# Altium footprint library MTGW_R09.PcbLib: 55 footprints (part 3 of 4)
Each footprint in its own frame and in the unit in brackets; x right, y up, seen from the top. Pads: shape width x height; smd on the part's side, far side on the other; paste and mask are expansions set on the pad; w line width, h text height; cw(c..) or ccw(c..) is an arc to the next point about the centre after c.
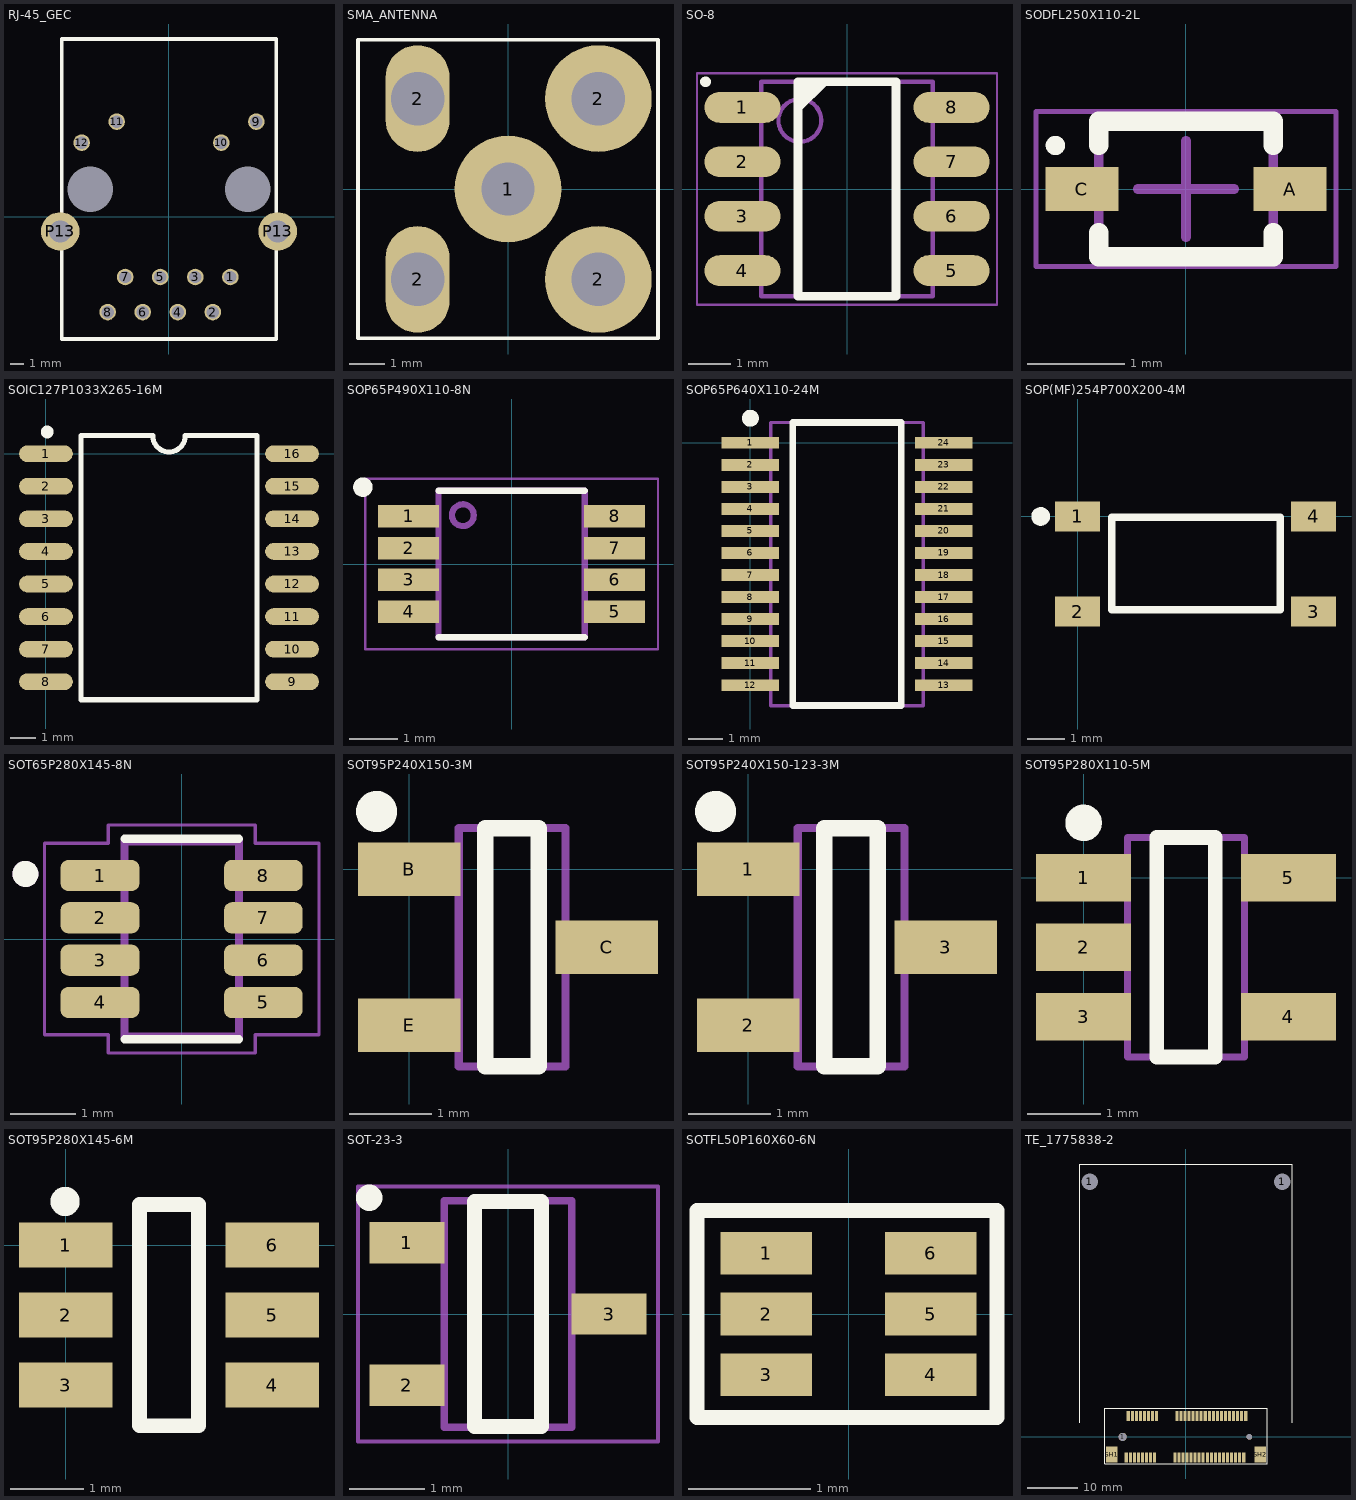
[diagram p2: the footprints below, top view; thin cyan lines are the x and y axes]

## RJ-45_GEC [mm]
pads (16):
  round 1.2 hole 0.9: 1(4.445,-4.355) 2(3.175,-6.895) 3(1.905,-4.355) 4(0.635,-6.895) 5(-0.635,-4.355) 6(-1.905,-6.895) 7(-3.175,-4.355) 8(-4.445,-6.895) 9(6.325,6.895) 10(3.785,5.375) 11(-3.785,6.895) 12(-6.325,5.375)
  round 0 hole 3.3 unplated: P11(5.715,1.995) P12(-5.715,1.995)
  round 2.794 hole 1.6: P13(-7.875,-1.055) P13(7.875,-1.055)
Top Overlay:
  lines w0.254: -7.775,-8.845 -7.775,12.875 7.775,12.875 7.775,-8.845 -7.775,-8.845
3D body "User Library-KLS12-TL076.step": height 15.8, standoff -3.5, extent -9.875,-8.555 9.875,13.345

## SMA_ANTENNA [mm]
pads (5):
  round 3 hole 1.5: 1(0,0) 2(2.54,-2.54) 2(2.54,2.54)
  oval 1.8x3 hole 1.5: 2(-2.54,-2.54) 2(-2.54,2.54)
Top Overlay:
  lines w0.1: -4.216,-4.191 -4.216,4.191 4.216,4.191 4.216,-4.191 -4.216,-4.191
3D body "731000114.stp": height 9.58, standoff -3.92, extent -11.625,-3.175 3.175,3.175

## SO-8 [mm]
pads (8):
  oval 1.78x0.72 smd: 1(-2.44,1.905) 2(-2.44,0.635) 3(-2.44,-0.635) 4(-2.44,-1.905) 5(2.44,-1.905) 6(2.44,-0.635) 7(2.44,0.635) 8(2.44,1.905)
Top Overlay:
  circle w0.25: c-3.3,2.5 r0
  region: -0.45,2.45 -1.1,1.8 -1.1,2.45
  lines w0.2: -1.143,-2.5 -1.143,2.5 1.143,2.5 1.143,-2.5 -1.143,-2.5
Mechanical 13:
  circle w0.1: c-1.1,1.6 r0.5
  lines w0.1: -2,-2.5 -2,2.5 2,2.5 2,-2.5 -2,-2.5
Mechanical 15:
  lines w0.05: -3.5,-2.7 -3.5,2.7 3.5,2.7 3.5,-2.7 -3.5,-2.7
  text ".Designator" at -3.4,1.6 h1.5
3D body "User Library-SO8-1.step": height 1.75, standoff 0, extent -3.1,-2.5 3.1,2.5

## SODFL250X110-2L [mm]
pads (2):
  rect 0.75x0.45 smd: A(1.075,0) C(-1.075,0)
Top Overlay:
  circle w0.1: c-1.35,0.45 r0.05
  lines w0.2: -0.9,-0.45 -0.9,-0.7 0.9,-0.7 0.9,-0.45 ; -0.9,0.45 -0.9,0.7 0.9,0.7 0.9,0.45
Mechanical 13:
  lines w0.1: -0.9,-0.7 0.9,-0.7 0.9,0.7 -0.9,0.7 -0.9,-0.7
Mechanical 15:
  lines w0.05: -1.55,-0.8 1.55,-0.8 1.55,0.8 -1.55,0.8 -1.55,-0.8
  lines w0.1: -0.5,0 0.5,0 ; 0,-0.5 0,0.5
3D body: height 1.1, standoff 0, extent -0.9,-0.7 0.9,0.7

## SOIC127P1033X265-16M [mm]
pads (16):
  oval 2.1x0.65 smd: 1(0,0) 2(0,-1.27) 3(0,-2.54) 4(0,-3.81) 5(0,-5.08) 6(0,-6.35) 7(0,-7.62) 8(0,-8.89) 9(9.6,-8.89) 10(9.6,-7.62) 11(9.6,-6.35) 12(9.6,-5.08) 13(9.6,-3.81) 14(9.6,-2.54) 15(9.6,-1.27) 16(9.6,0)
Top Overlay:
  circle w0.25: c0.05,0.85 r0.125
  lines w0.2: 1.375,-9.595 1.375,0.705 4.165,0.705 ccw(c4.8,0.705) 5.435,0.705 8.225,0.705 8.225,-9.595 1.375,-9.595
3D body "User Library-so16w.STEP": height 3.49, standoff -0.01, extent -0.305,-9.59 9.995,0.61

## SOP65P490X110-8N [mm]
pads (8):
  rect 1.25x0.46 smd: 1(-2.11,0.975) 2(-2.11,0.325) 3(-2.11,-0.325) 4(-2.11,-0.975) 5(2.11,-0.975) 6(2.11,-0.325) 7(2.11,0.325) 8(2.11,0.975)
Top Overlay:
  circle w0.2: c-3.05,1.575 r0.1
  lines w0.127: -1.5,-1.5 1.5,-1.5 ; -1.5,1.5 1.5,1.5
Mechanical 13:
  circle w0.127: c-1,1 r0.224
  lines w0.127: -1.5,-1.5 1.5,-1.5 1.5,1.5 -1.5,1.5 -1.5,-1.5
Mechanical 15:
  lines w0.05: -3,-1.75 3,-1.75 3,1.75 -3,1.75 -3,-1.75
3D body "User Library-TSSOP8-1.step": height 1.1, standoff 0, extent -2.101,-1.525 1.999,1.575

## SOP65P640X110-24M [mm]
pads (24):
  rect 1.7x0.35 smd: 1(0,0) 2(0,-0.65) 3(0,-1.3) 4(0,-1.95) 5(0,-2.6) 6(0,-3.25) 7(0,-3.9) 8(0,-4.55) 9(0,-5.2) 10(0,-5.85) 11(0,-6.5) 12(0,-7.15) 13(5.7,-7.15) 14(5.7,-6.5) 15(5.7,-5.85) 16(5.7,-5.2) 17(5.7,-4.55) 18(5.7,-3.9) 19(5.7,-3.25) 20(5.7,-2.6) 21(5.7,-1.95) 22(5.7,-1.3) 23(5.7,-0.65) 24(5.7,0)
Top Overlay:
  circle w0.25: c0,0.725 r0.125
  lines w0.2: 1.25,-7.75 4.45,-7.75 4.45,0.6 1.25,0.6 1.25,-7.75
Mechanical 2:
  lines w0.1: 0.6,-7.76 0.6,0.6 5.1,0.6 5.1,-7.76 0.6,-7.76
3D body "User Library-TSSOP24_(JEDEC_MO-153).STEP": height 1.2, standoff 0, extent -0.424,-7.505 6.132,0.394

## SOP(MF)254P700X200-4M [mm]
pads (4):
  rect 1.2x0.8 smd: 1(0,0) 2(0,-2.54) 3(6.3,-2.54) 4(6.3,0)
Top Overlay:
  circle w0.25: c-0.989,0 r0.125
  lines w0.2: 0.914,-2.489 0.914,-0.025 5.41,-0.025 5.41,-2.489 0.914,-2.489
3D body "User Library-4-SOP.STEP": height 2.1, standoff 0, extent -0.241,-3.39 6.559,0.91

## SOT65P280X145-8N [mm]
pads (8):
  rrect50% 1.21x0.48 smd: 1(-1.255,0.975) 2(-1.255,0.325) 3(-1.255,-0.325) 4(-1.255,-0.975) 5(1.255,-0.975) 6(1.255,-0.325) 7(1.255,0.325) 8(1.255,0.975)
Top Overlay:
  circle w0.2: c-2.4,1 r0.1
  lines w0.127: -0.88,-1.54 0.88,-1.54 ; -0.88,1.54 0.88,1.54
Mechanical 13:
  circle w0.2: c-2.4,1 r0.1
  lines w0.127: -0.88,-1.5 0.88,-1.5 0.88,1.5 -0.88,1.5 -0.88,-1.5
Mechanical 15:
  lines w0.05: -2.11,-1.47 -2.11,1.47 -1.13,1.47 -1.13,1.75 1.13,1.75 1.13,1.47 2.11,1.47 2.11,-1.47 1.13,-1.47 1.13,-1.75 -1.13,-1.75 -1.13,-1.47 -2.11,-1.47
3D body "21-0078H_MXM.step": height 1.45, standoff 0, extent -1.5,-1.499 1.5,1.499

## SOT95P240X150-3M [mm]
pads (3):
  rect 1.25x0.65 smd: B(0,0) C(2.4,-0.95) E(0,-1.9)
Top Overlay:
  circle w0.25: c-0.399,0.701 r0.125
  lines w0.2: 0.925,-2.4 0.925,0.5 1.575,0.5 1.575,-2.4 0.925,-2.4
Mechanical 2:
  lines w0.1: 0.6,-2.4 1.9,-2.4 1.9,0.5 0.6,0.5 0.6,-2.4
3D body "User Library-SOT23-3.STEP": height 1.3, standoff 0, extent -0.232,-2.39 2.568,0.51

## SOT95P240X150-123-3M [mm]
pads (3):
  rect 1.25x0.65 smd: 1(0,0) 2(0,-1.9) 3(2.4,-0.95)
Top Overlay:
  circle w0.25: c-0.399,0.701 r0.125
  lines w0.2: 0.925,-2.4 1.575,-2.4 1.575,0.5 0.925,0.5 0.925,-2.4
Mechanical 2:
  lines w0.1: 0.6,-2.4 0.6,0.5 1.9,0.5 1.9,-2.4 0.6,-2.4
3D body "User Library-SOT23-3.STEP": height 1.3, standoff 0, extent -0.231,-2.39 2.569,0.51

## SOT95P280X110-5M [mm]
pads (5):
  rect 1.3x0.65 smd: 1(0,0) 2(0,-0.95) 3(0,-1.9) 4(2.8,-1.9) 5(2.8,0)
Top Overlay:
  circle w0.25: c0,0.75 r0.125
  lines w0.2: 1,-2.45 1.8,-2.45 1.8,0.55 1,0.55 1,-2.45
Mechanical 2:
  lines w0.1: 0.6,-2.45 2.2,-2.45 2.2,0.55 0.6,0.55 0.6,-2.45
3D body "User Library-SOT23-5-1.STEP": height 1.3, standoff 0, extent -0.1,-2.45 2.9,0.55

## SOT95P280X145-6M [mm]
pads (6):
  rect 1.27x0.61 smd: 1(0,0) 2(0,-0.95) 3(0,-1.9) 4(2.8,-1.9) 5(2.8,-0.95) 6(2.8,0)
Top Overlay:
  circle w0.254: c-0.01,0.592 r0.072
  lines w0.2: 1,-2.45 1.8,-2.45 1.8,0.55 1,0.55 1,-2.45
3D body "User Library-SOT23-6.STEP": height 1.3, standoff 0, extent -0.128,-2.465 2.872,0.535

## SOT-23-3 [mm]
pads (3):
  rect 1x0.55 smd: 1(-1.35,0.95) 2(-1.35,-0.95) 3(1.35,0)
Top Overlay:
  circle w0.25: c-1.85,1.55 r0.05
  lines w0.2: -0.45,-1.5 -0.45,1.5 0.45,1.5 0.45,-1.5 -0.45,-1.5
Mechanical 13:
  lines w0.1: -0.85,-1.51 0.85,-1.51 0.85,1.51 -0.85,1.51 -0.85,-1.51
Mechanical 15:
  lines w0.05: -2,-1.7 2,-1.7 2,1.7 -2,1.7 -2,-1.7
  text ".Designator" at -1.9,0.5 h1.5
3D body "CircuitWorks-SOT-23.step": height 1.1, standoff 0, extent -1.25,-1.5 1.25,1.5

## SOTFL50P160X60-6N [mm]
pads (6):
  rect 0.75x0.35 smd: 1(-0.675,0.5) 2(-0.675,0) 3(-0.675,-0.5) 4(0.675,-0.5) 5(0.675,0) 6(0.675,0.5)
Top Overlay:
  lines w0.12: -1.245,-0.85 1.219,-0.85 1.219,0.85 -1.245,0.85 -1.245,-0.85
  text "." at -0.838,1.168 h2

## TE_1775838-2 [mm]
pads (58):
  round 2.6 hole 3.2 unplated: 1(-19,50.38) 1(19,50.38)
  round 1.6 hole 1.6 unplated: 1(-12.5,0)
  rect 0.6x2 smd: 1(-11.8,-4.1) 2(-11.4,4.1) 3(-11,-4.1) 4(-10.6,4.1) 5(-10.2,-4.1) 6(-9.8,4.1) 7(-9.4,-4.1) 8(-9,4.1) 9(-8.6,-4.1) 10(-8.2,4.1) 11(-7.8,-4.1) 12(-7.4,4.1) 13(-7,-4.1) 14(-6.6,4.1) 15(-6.2,-4.1) 16(-5.8,4.1) 17(-2.2,-4.1) 18(-1.8,4.1) 19(-1.4,-4.1) 20(-1,4.1) 21(-0.6,-4.1) 22(-0.2,4.1) 23(0.2,-4.1) 24(0.6,4.1) 25(1,-4.1) 26(1.4,4.1) 27(1.8,-4.1) 28(2.2,4.1) 29(2.6,-4.1) 30(3,4.1) 31(3.4,-4.1) 32(3.8,4.1) 33(4.2,-4.1) 34(4.6,4.1) 35(5,-4.1) 36(5.4,4.1) 37(5.8,-4.1) 38(6.2,4.1) 39(6.6,-4.1) 40(7,4.1) 41(7.4,-4.1) 42(7.8,4.1) 43(8.2,-4.1) 44(8.6,4.1) 45(9,-4.1) 46(9.4,4.1) 47(9.8,-4.1) 48(10.2,4.1) 49(10.6,-4.1) 50(11,4.1) 51(11.4,-4.1) 52(11.8,4.1)
  round 1.1 hole 1.1 unplated: 1(12.5,0)
  rect 2.3x3.2 smd: SH1(-14.65,-3.5) SH2(14.65,-3.5)
Top Overlay:
  lines w0.05: -16.05,-5.35 16.05,-5.35 16.05,5.67 -16.05,5.67 -16.05,-5.35
  lines w0.203: -21,2.78 -21,53.88 21,53.88 21,2.78
3D body "c-1775838-2-g-3d.stp": height 5.56, standoff -0.69, extent -14.965,-4.565 14.935,4.515
3D body "Y_IMX28_CSOM_R1.stp": height 7.25, standoff 0.3, extent -21,-0.136 21,52.864